# Altium footprint library PcbLib1.PcbLib: 21 footprints (part 2 of 2)
Each footprint in its own frame and in the unit in brackets; x right, y up, seen from the top. Pads: shape width x height; smd on the part's side, far side on the other; paste and mask are expansions set on the pad; w line width, h text height; cw(c..) or ccw(c..) is an arc to the next point about the centre after c.
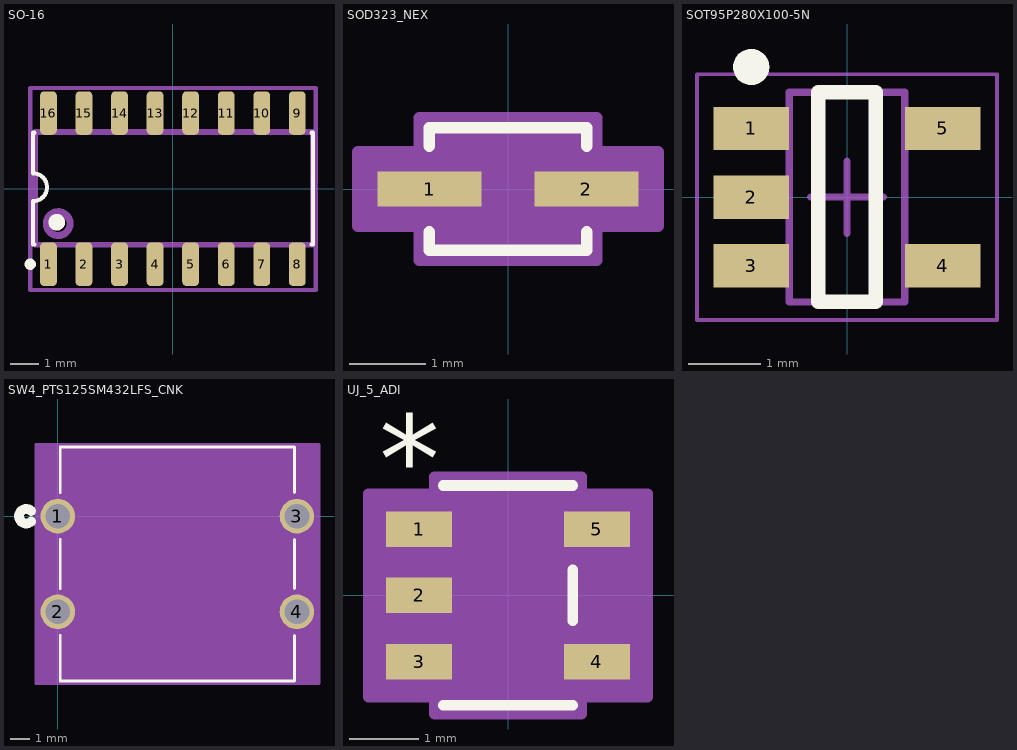
[diagram p1: the footprints below, top view; thin cyan lines are the x and y axes]

## SO-16 [mm]
pads (16):
  rrect50% 0.6x1.55 smd mask+0.05: 1(-4.445,-2.7) 2(-3.175,-2.7) 3(-1.905,-2.7) 4(-0.635,-2.7) 5(0.635,-2.7) 6(1.905,-2.7) 7(3.175,-2.7) 8(4.445,-2.7) 9(4.445,2.7) 10(3.175,2.7) 11(1.905,2.7) 12(0.635,2.7) 13(-0.635,2.7) 14(-1.905,2.7) 15(-3.175,2.7) 16(-4.445,2.7)
Top Overlay:
  circle w0.3: c-4.145,-1.2 r0.15
  circle w0.2: c-5.095,-2.7 r0.1
  lines w0.15: -4.945,-2 -4.995,-2 -4.995,-0.45 ccw(c-4.995,0.05) -4.995,0.55 -4.995,2 -4.945,2 ; 4.955,-2 5.005,-2 5.005,2 4.955,2
Top Assembly:
  circle w0.254: c-4.095,-1.25 r0.425
  lines w0.2: -4.92,-2 5.005,-2 5.005,2.025 -4.92,2.025 -4.92,-2
Top Courtyard:
  lines w0.15: -5.095,-3.625 -5.095,3.6 5.105,3.6 5.105,-3.625 -5.095,-3.625
3D body "User_Library-so16-1.stp": height 1.73, standoff -0.04, extent -5.03,-3.118 4.94,3.018

## SOD323_NEX [mil]
pads (2):
  rect 53.5x18 smd paste+0 mask+0: 1(-40.25,0) 2(40.25,0)
Top Overlay:
  lines w6: -40.5,-22.1 -40.5,-31.5 40.5,-31.5 40.5,-22.1 ; -40.5,22.1 -40.5,31.5 40.5,31.5 40.5,22.1
Keep-Out Layer:
  region: 0,0
Mechanical 13:
  lines w1: -35.5,-13.25 -22.25,-26.5 ; -35.5,13.25 -22.25,26.5 ; -53,-8 -35.5,-8 -35.5,8 -53,8 -53,-8 ; -35.5,-26.5 -35.5,26.5 35.5,26.5 35.5,-26.5 -35.5,-26.5 ; 35.5,-8 53,-8 53,8 35.5,8 35.5,-8
Mechanical 15:
  region: -45.5,-19 -77,-19 -77,19 -45.5,19 -45.5,36.5 45.5,36.5 45.5,19 77,19 77,-19 45.5,-19 45.5,-36.5 -45.5,-36.5
  lines w6: -77,-19 -45.5,-19 -45.5,-36.5 45.5,-36.5 45.5,-19 77,-19 77,19 45.5,19 45.5,36.5 -45.5,36.5 -45.5,19 -77,19 -77,-19
3D body "SOD323_NEX.step": height 43.11, standoff 0, extent -52.99,-26.5 52.99,26.5

## SOT95P280X100-5N [mm] "SOT23, 5-Leads, Body 2,90x2,80mm, Pitch 0,95mm, IPC Medium Density"
height 1
pads (5):
  rect 1.05x0.6 smd: 1(-1.325,0.95) 2(-1.325,0) 3(-1.325,-0.95) 4(1.325,-0.95) 5(1.325,0.95)
Top Overlay:
  circle w0.25: c-1.325,1.8 r0.125
  lines w0.2: -0.4,-1.45 0.4,-1.45 0.4,1.45 -0.4,1.45 -0.4,-1.45
Top Assembly:
  lines w0.1: -0.8,-1.45 -0.8,1.45 0.8,1.45 0.8,-1.45 -0.8,-1.45
Top Courtyard:
  lines w0.05: -2.075,-1.7 -2.075,1.7 2.075,1.7 2.075,-1.7 -2.075,-1.7
  lines w0.1: -0.5,0 0.5,0 ; 0,-0.5 0,0.5
3D body "SOT95P280X100-5N.step": height 1, standoff 0, extent -1.4,-1.45 1.4,1.45

## SW4_PTS125SM432LFS_CNK [mil]
pads (4):
  round 71 hole 51 paste-99999 mask+0: 1(0,0) 2(0,-196.85) 3(492.13,0) 4(492.13,-196.85)
Top Overlay:
  lines w6: 5.06,-245.19 5.06,-339.43 487.06,-339.43 487.06,-245.19 ; 5.06,-148.51 5.06,-48.34 ; 5.06,48.34 5.06,142.57 487.06,142.57 487.06,48.34 ; 487.06,-148.51 487.06,-48.34
  lines w20: -54.54,-10.81 cw(c-64.94,0) -54.54,10.81
Bottom Overlay:
  circle w20: c-64.94,0 r15
Mechanical 13:
  circle w20: c0,75 r15
  lines w1: 10.06,-334.43 482.06,-334.43 482.06,137.57 10.06,137.57 10.06,-334.43
Mechanical 15:
  region: 537.63,147.57 -45.5,147.57 -45.5,-344.43 537.63,-344.43
  lines w6: -45.5,-344.43 -45.5,147.57 537.63,147.57 537.63,-344.43 -45.5,-344.43
3D body "User Library-Tact button12x12.STEP": height 511.81, standoff 0, extent -67.05,-336.22 555,136.22

## UJ_5_ADI [mil]
pads (5):
  rect 37.28x20 smd paste+0 mask+0: 1(-50.14,37.4) 2(-50.14,0) 3(-50.14,-37.4) 4(50.14,-37.4) 5(50.14,37.4)
Top Overlay:
  lines w6: -36.5,-62 36.5,-62 ; -36.5,62 36.5,62 ; 36.5,-14.3 36.5,14.3
  text "*" at -72.64,52.4 h50
Mechanical 13:
  lines w1: -12,57 ccw(c0,57) 12,57 ; -55,-47.4 -55,-27.4 -31.5,-27.4 -31.5,-47.4 -55,-47.4 ; -55,-10 -55,10 -31.5,10 -31.5,-10 -55,-10 ; -55,27.4 -55,47.4 -31.5,47.4 -31.5,27.4 -55,27.4 ; -31.5,-57 31.5,-57 31.5,57 -31.5,57 -31.5,-57 ; 31.5,-47.4 31.5,-27.4 55,-27.4 55,-47.4 31.5,-47.4 ; 31.5,27.4 31.5,47.4 55,47.4 55,27.4 31.5,27.4
  text "*" at -34,14.4 h50
Mechanical 15:
  region: 41.5,-67 -41.5,-67 -41.5,-57.4 -78.78,-57.4 -78.78,57.4 -41.5,57.4 -41.5,67 41.5,67 41.5,57.4 78.78,57.4 78.78,-57.4 41.5,-57.4
  lines w6: -78.78,-57.4 -41.5,-57.4 -41.5,-67 41.5,-67 41.5,-57.4 78.78,-57.4 78.78,57.4 41.5,57.4 41.5,67 -41.5,67 -41.5,57.4 -78.78,57.4 -78.78,-57.4
3D body "UJ_5_ADI.step": height 39.09, standoff 0, extent -55,-57.01 55,57.01